# Altium schematic symbol library Schlib1.SchLib: 1 symbol
Pins are listed as number, name and electrical type; pins without a type are passive.

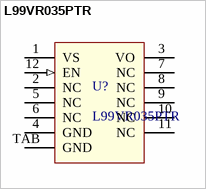
[diagram p0: symbol L99VR035PTR]

## L99VR035PTR
designator U?
LDO Voltage Regulators Automotive Low Dropout Linear Voltage Regulator 300 mA of current capability
footprint PWSSO-12 (L99VR035PTR)
pins: 1 VS (power), 2 NC, 3 VO (power), 4 GND (power), 5 NC, 6 NC, 7 NC, 8 NC, 9 NC, 10 NC, 11 NC, 12 EN (in), TAB GND